# Altium schematic symbol library Contatos.SchLib: 6 symbols
Pins are listed as number, name and electrical type; pins without a type are passive.

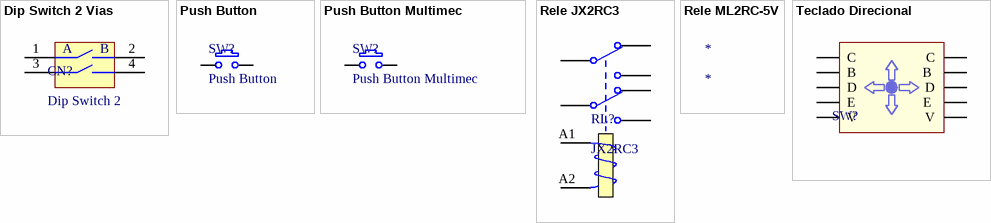
[diagram p0: symbols Dip Switch 2 Vias to Teclado Direcional]

## Dip Switch 2 Vias
designator CN?, comment Dip Switch 2
DIP Switches / SIP Switches Dip switch Slide Type; Partnumber: NDSR-02V; Manufacturer: Diptronics; Datasheet: https://br.mouser.com/datasheet/2/910/DS_1-1571341.pdf
footprint DIP_SWITCH_2 (DIP Switches / SIP Switches Dip switch Slide Type)
pins: 1 1A, 2 1B, 3 2A, 4 2B
text: A; B

## Push Button
designator SW?
Chave Tactil 4 terminais 6x6x5mm - KFC-A06
footprint Chave Tactil 6x6x5
pins: 1, 2

## Push Button Multimec
designator SW?
footprint Botao_Multimec
pins: 1, 2

## Rele JX2RC3
designator RL?, comment JX2RC3
Rele 24VDC 5A DPDT Metaltex
footprint RELE DPDT (General Purpose Relay DPDT)
pins: A1, A2, C1, C2, NA1, NA2, NF1, NF2

## Rele ML2RC-5V
designator *

## Teclado Direcional
designator SW?
Teclado Direcional associando botões Multimec
footprint Teclado_Direcional
pins: 1 C, 2 C, 3 B, 4 B , 5 D, 6 D, 7 E, 8 E , 9 V, 10 V